# Altium integrated library ULN2803AN.IntLib: 1 symbol
Pins are listed as number, name and electrical type; pins without a type are passive.

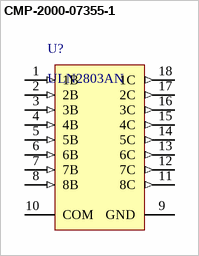
[diagram p0: symbol CMP-2000-07355-1]

## CMP-2000-07355-1
designator U?, comment ULN2803AN
Darlington Transistor Array, 50 V Output, -40 to 85 degC, 18-Pin PDIP (N), Pb-Free (RoHS), Tube; Manufacturer: Texas Instruments; No. of Pins: 18Pins; DC Collector Current: 500mA; Package Version: 4040049/E, 12/2002; Collector Emitter Voltage V(br)ceo: 50V; Transistor Polarity: NPN; SVHC: NoSVHC(15-Jun-2015); Transistor Case Style: DIP; Datasheet URL: https://datasheet.ciiva.com/19457/700664-19457425.pdf; Mounting Technology: ThroughHole; Operating Temperature Max: 85°C; Package Reference: N18; MSL: -; Package URL: http://www.ti.com/lit/ml/mpdi002c/mpdi002c.pdf; Power Dissipation Pd: -; Manufacturer URL: http://www.ti.com/; Package Description: 18-Pin Double In-line Package, Body 22.48 x 6.35 mm, Pitch 2.54 mm; Product Range: -; Datasheet Version: Rev. E, 07/2006; Automotive Qualification Standard: -; DC Current Gain hFE: -
footprint N0018A (DIP, 18-Leads, Body 22.48x6.35 mm, Pitch 2.54 mm, Row Spacing 7.62mm)
pins: 1 1B (in), 2 2B (in), 3 3B (in), 4 4B (in), 5 5B (in), 6 6B (in), 7 7B (in), 8 8B (in), 9 GND (power), 10 COM, 11 8C (out), 12 7C (out), 13 6C (out), 14 5C (out), 15 4C (out), 16 3C (out), 17 2C (out), 18 1C (out)